# Altium footprint library 2020-05-11_11-49-00.PcbLib: 1 footprints
Each footprint in its own frame and in the unit in brackets; x right, y up, seen from the top. Pads: shape width x height; smd on the part's side, far side on the other; paste and mask are expansions set on the pad; w line width, h text height; cw(c..) or ccw(c..) is an arc to the next point about the centre after c.
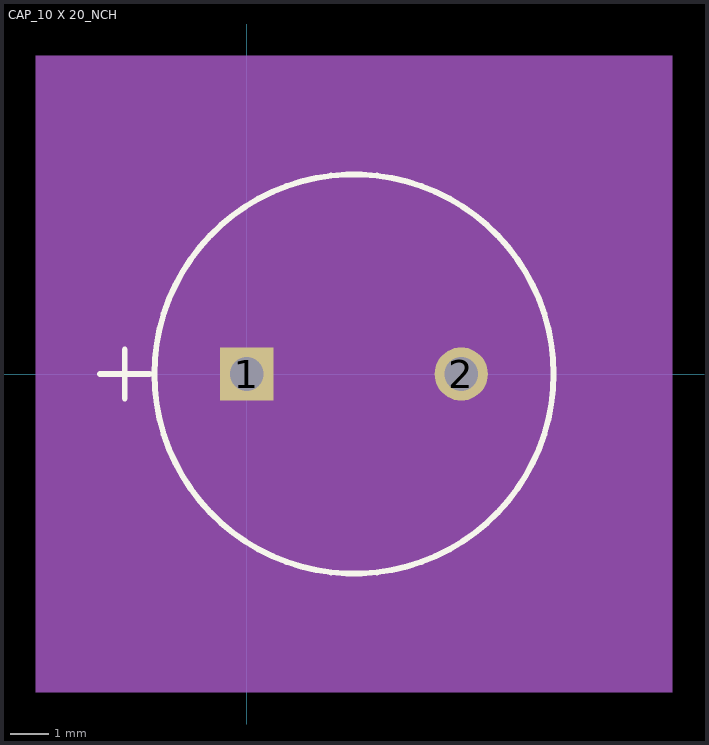
[diagram p0: the footprint, top view; thin cyan lines are the x and y axes]

## CAP_10 X 20_NCH [mil]
pads (2):
  rect 54x54 hole 34 mask+0: 1(0,0)
  round 54 hole 34 mask+0: 2(217,0)
Top Overlay:
  circle w6: c108.5,0 r202
  lines w6: -148.5,0 -98.5,0 ; -123.5,-25 -123.5,25
Mechanical 5:
  region: 430.5,-322 -213.5,-322 -213.5,322 430.5,322
Mechanical 7:
  lines w1: -88.5,0 -88.5,262 ; 0,-262 0,0 ; 108.5,-197 370.5,-197 ; 108.5,197 370.5,197 ; 217,-262 217,0 ; 305.5,0 305.5,262 ; -88.5,247 305.5,247 ; -88.5,247 -78.5,252 -78.5,242 -88.5,247 ; 0,-247 217,-247 ; 0,-247 10,-242 10,-252 0,-247 ; 217,-247 207,-242 207,-252 217,-247 ; 305.5,247 295.5,252 295.5,242 305.5,247 ; 355.5,-197 355.5,197 ; 355.5,-197 350.5,-187 360.5,-187 355.5,-197 ; 355.5,197 350.5,187 360.5,187 355.5,197
  text "Pin 1 Pad Style: SX54Y54D34P" at -241.5,-397 h50
  text "Default Pad Style: EX54Y54D34P" at -266.5,-472 h50
  text "Alt 1 Pad Style: OX60Y90D30P" at -241.5,-547 h50
  text "Alt 2 Pad Style: OX90Y60D30P" at -241.5,-622 h50
  text "0.217in/5.512mm" at 14.75,-292 h25
  text "0.394in/10.008mm" at 8.5,267 h25
  text "0.394in/10.008mm" at 375.5,-12.5 h25
Mechanical 13:
  circle w0: c108.5,0 r197
  lines w1: -148.5,0 -98.5,0 ; -123.5,-25 -123.5,25
Mechanical 15:
  region: -98.5,85.24 23.26,207 193.74,207 315.5,85.24 315.5,-85.24 193.74,-207 23.26,-207 -98.5,-85.24
  lines w1: -98.5,-85.24 23.26,-207 193.74,-207 315.5,-85.24 315.5,85.24 193.74,207 23.26,207 -98.5,85.24 -98.5,-85.24
3D body: height 10, standoff 0, extent 0,0 10,10